# Altium footprint library 4N25SM.PcbLib: 1 footprints
Each footprint in its own frame and in the unit in brackets; x right, y up, seen from the top. Pads: shape width x height; smd on the part's side, far side on the other; paste and mask are expansions set on the pad; w line width, h text height; cw(c..) or ccw(c..) is an arc to the next point about the centre after c.
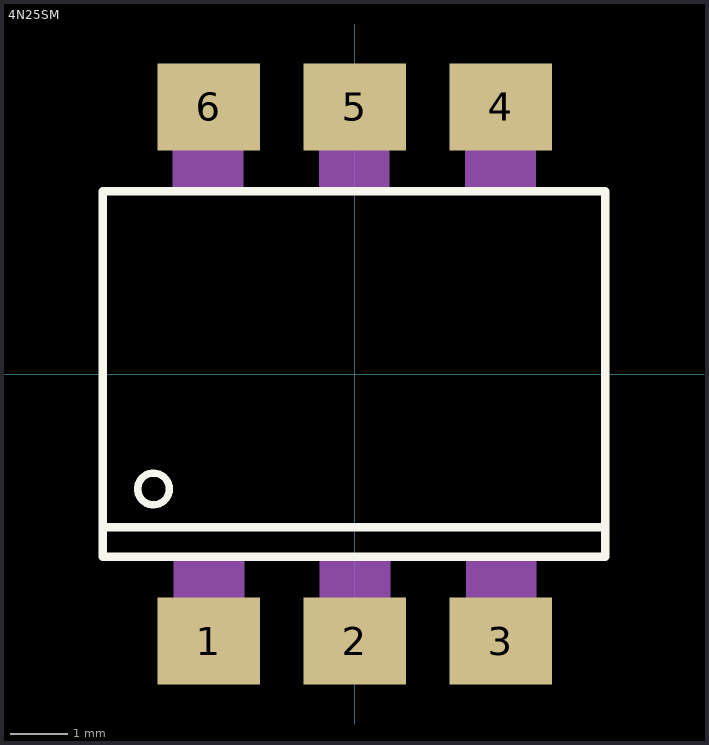
[diagram p0: the footprint, top view; thin cyan lines are the x and y axes]

## 4N25SM [mm] "4N25SM"
pads (6):
  rect 1.78x1.52 smd: 1(-2.54,-4.645) 2(0,-4.645) 3(2.54,-4.645) 4(2.54,4.645) 5(0,4.645) 6(-2.54,4.645)
Top Overlay:
  circle w0.127: c-3.5,-2 r0.276
  lines w0.152: -4.285,-2.664 4.36,-2.664 ; 4.36,-2.664 4.36,-3.18 -4.385,-3.18 -4.385,3.18 4.36,3.18 4.36,-2.664
Mechanical 13:
  region: -1.935,3.203 -3.163,3.203 -3.163,4.95 -1.935,4.95
  region: 0.605,3.203 -0.621,3.203 -0.621,4.95 0.605,4.95
  region: 3.145,3.202 1.921,3.202 1.921,4.95 3.145,4.95
  region: 3.16,-4.959 1.939,-4.959 1.939,-3.2 3.16,-3.2
  region: 0.62,-4.953 -0.605,-4.953 -0.605,-3.2 0.62,-3.2
  region: -1.92,-4.951 -3.146,-4.951 -3.146,-3.2 -1.92,-3.2
3D body "4N25SM.STEP": height 5.08, standoff 0, extent -4.255,-4.583 4.255,4.583